# Altium footprint library LQFP100-14X14MM.PcbLib: 1 footprints
Each footprint in its own frame and in the unit in brackets; x right, y up, seen from the top. Pads: shape width x height; smd on the part's side, far side on the other; paste and mask are expansions set on the pad; w line width, h text height; cw(c..) or ccw(c..) is an arc to the next point about the centre after c.
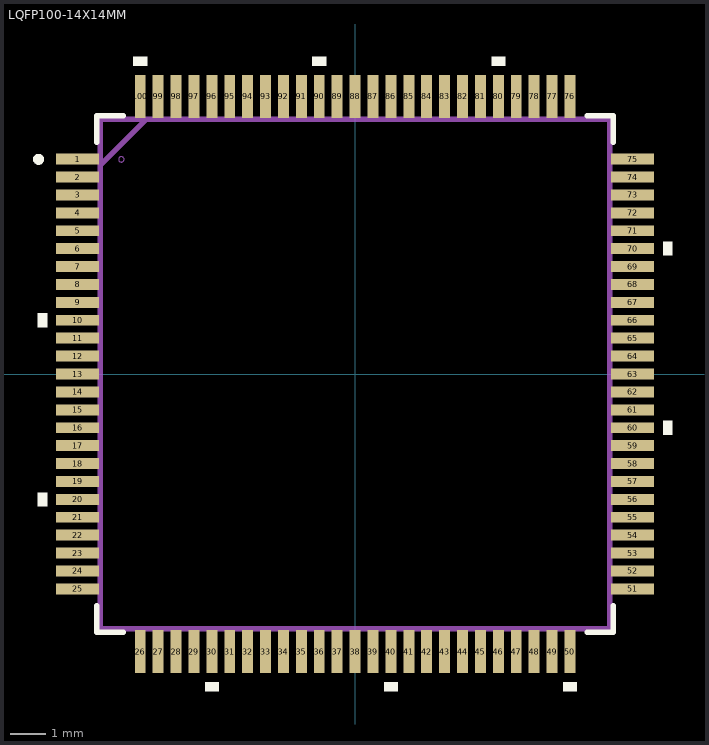
[diagram p0: the footprint, top view; thin cyan lines are the x and y axes]

## LQFP100-14X14MM [mil]
pads (100):
  rect 47x12 smd: 1(-305.12,236.22) 2(-305.12,216.53) 3(-305.12,196.85) 4(-305.12,177.17) 5(-305.12,157.48) 6(-305.12,137.8) 7(-305.12,118.11) 8(-305.12,98.42) 9(-305.12,78.74) 10(-305.12,59.06) 11(-305.12,39.37) 12(-305.12,19.68) 13(-305.12,0) 14(-305.12,-19.68) 15(-305.12,-39.37) 16(-305.12,-59.06) 17(-305.12,-78.74) 18(-305.12,-98.42) 19(-305.12,-118.11) 20(-305.12,-137.8) 21(-305.12,-157.48) 22(-305.12,-177.17) 23(-305.12,-196.85) 24(-305.12,-216.53) 25(-305.12,-236.22) 51(305.12,-236.22) 52(305.12,-216.53) 53(305.12,-196.85) 54(305.12,-177.17) 55(305.12,-157.48) 56(305.12,-137.8) 57(305.12,-118.11) 58(305.12,-98.42) 59(305.12,-78.74) 60(305.12,-59.06) 61(305.12,-39.37) 62(305.12,-19.68) 63(305.12,0) 64(305.12,19.68) 65(305.12,39.37) 66(305.12,59.06) 67(305.12,78.74) 68(305.12,98.42) 69(305.12,118.11) 70(305.12,137.8) 71(305.12,157.48) 72(305.12,177.17) 73(305.12,196.85) 74(305.12,216.53) 75(305.12,236.22)
  rect 12x47 smd: 26(-236.22,-305.12) 27(-216.53,-305.12) 28(-196.85,-305.12) 29(-177.17,-305.12) 30(-157.48,-305.12) 31(-137.8,-305.12) 32(-118.11,-305.12) 33(-98.42,-305.12) 34(-78.74,-305.12) 35(-59.06,-305.12) 36(-39.37,-305.12) 37(-19.68,-305.12) 38(0,-305.12) 39(19.68,-305.12) 40(39.37,-305.12) 41(59.06,-305.12) 42(78.74,-305.12) 43(98.42,-305.12) 44(118.11,-305.12) 45(137.8,-305.12) 46(157.48,-305.12) 47(177.17,-305.12) 48(196.85,-305.12) 49(216.53,-305.12) 50(236.22,-305.12) 76(236.22,305.12) 77(216.53,305.12) 78(196.85,305.12) 79(177.17,305.12) 80(157.48,305.12) 81(137.8,305.12) 82(118.11,305.12) 83(98.42,305.12) 84(78.74,305.12) 85(59.06,305.12) 86(39.37,305.12) 87(19.68,305.12) 88(0,305.12) 89(-19.68,305.12) 90(-39.37,305.12) 91(-59.06,305.12) 92(-78.74,305.12) 93(-98.42,305.12) 94(-118.11,305.12) 95(-137.8,305.12) 96(-157.48,305.12) 97(-177.17,305.12) 98(-196.85,305.12) 99(-216.53,305.12) 100(-236.22,305.12)
Top Overlay:
  region: -228.72,338.62 -243.72,338.62 -243.72,348.62 -228.72,348.62
  region: -31.87,338.62 -46.87,338.62 -46.87,348.62 -31.87,348.62
  region: 164.98,338.62 149.98,338.62 149.98,348.62 164.98,348.62
  region: 348.62,130.3 338.62,130.3 338.62,145.3 348.62,145.3
  region: 348.62,-66.56 338.62,-66.56 338.62,-51.56 348.62,-51.56
  region: 243.72,-348.62 228.72,-348.62 228.72,-338.62 243.72,-338.62
  region: 46.87,-348.62 31.87,-348.62 31.87,-338.62 46.87,-338.62
  region: -149.98,-348.62 -164.98,-348.62 -164.98,-338.62 -149.98,-338.62
  region: -338.62,-145.3 -348.62,-145.3 -348.62,-130.3 -338.62,-130.3
  region: -338.62,51.56 -348.62,51.56 -348.62,66.56 -338.62,66.56
  lines w6: -284,-255 -284,-284 -255,-284 ; -284,255 -284,284 -255,284 ; 255,-284 284,-284 284,-255 ; 255,284 284,284 284,255 ; -351,236 cw(c-348,236) -345,236 cw(c-348,236) -351,236
Mechanical 13:
  lines w0: -260,236 cw(c-257,236) -254,236 cw(c-257,236) -260,236
  lines w6: -280,230 -230,280 ; -280,-280 -280,280 280,280 280,-280 -280,-280
3D body "step_temp.STEP": height 62.99, standoff 0, extent -314.96,-314.96 314.96,314.96